# EAGLE library part ATTINY25 (library madhu)
Atmel ATtiny25 AVR microcontroller
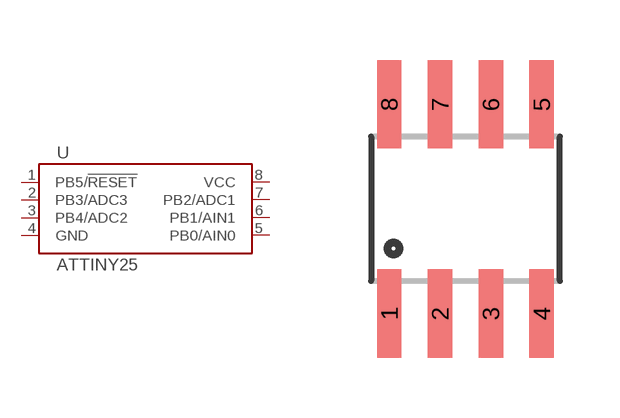
[diagram p11: symbol with the pads of SOIC-8; footprint SOIC-8]

Designator prefix U

## ATTINY25SOIC-8  [SOIC-8]
1  PB5/!RESET
2  PB3/ADC3
3  PB4/ADC2
4  GND  pwr
5  PB0/AIN0
6  PB1/AIN1
7  PB2/ADC1
8  VCC  pwr

## Footprint SOIC-8 (pad centres in mm)
Small Outline Package Fits JEDEC packages (narrow SOIC-8)
smd 0.61 x 2.21: 1 -1.905,-2.616; 2 -0.635,-2.616; 3 0.635,-2.616; 4 1.905,-2.616; 5 1.905,2.616; 6 0.635,2.616; 7 -0.635,2.616; 8 -1.905,2.616